# Altium footprint library SOIC-8_3.9x4.9mm_P1.27mm.PcbLib: 1 footprints
Each footprint in its own frame and in the unit in brackets; x right, y up, seen from the top. Pads: shape width x height; smd on the part's side, far side on the other; paste and mask are expansions set on the pad; w line width, h text height; cw(c..) or ccw(c..) is an arc to the next point about the centre after c.
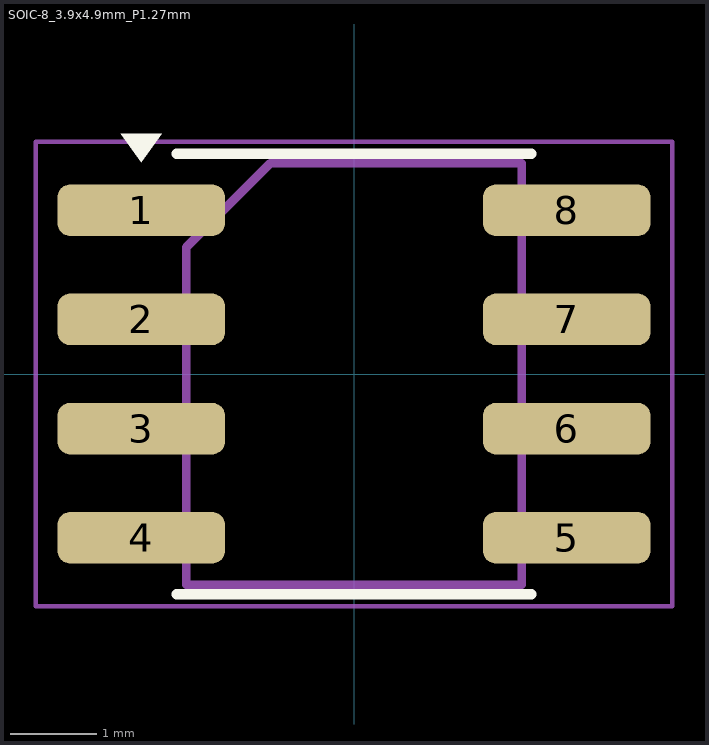
[diagram p0: the footprint, top view; thin cyan lines are the x and y axes]

## SOIC-8_3.9x4.9mm_P1.27mm [mm] "SOIC-8 150 mil, JEDEC MS-012AA; IPC-7351B gullwing density B; generated by ecadlib"
height 1.75
pads (8):
  rrect50% 1.95x0.6 smd: 1(-2.475,1.905) 2(-2.475,0.635) 3(-2.475,-0.635) 4(-2.475,-1.905) 5(2.475,-1.905) 6(2.475,-0.635) 7(2.475,0.635) 8(2.475,1.905)
Top Overlay:
  region: -2.475,2.465 -2.715,2.795 -2.235,2.795
  lines w0.12: -2.06,-2.56 2.06,-2.56 ; -2.06,2.56 2.06,2.56
  text ".Designator" at -1.391,2.9 h1
Mechanical 13:
  lines w0.1: -1.95,-2.45 1.95,-2.45 1.95,2.45 -0.975,2.45 -1.95,1.475 -1.95,-2.45
  text ".Comment" at -3.708,-3.9 h1
Mechanical 15:
  lines w0.05: -3.7,-2.7 3.7,-2.7 3.7,2.7 -3.7,2.7 -3.7,-2.7